# Altium schematic symbol library Antenna.SchLib: 34 symbols
Pins are listed as number, name and electrical type; pins without a type are passive.

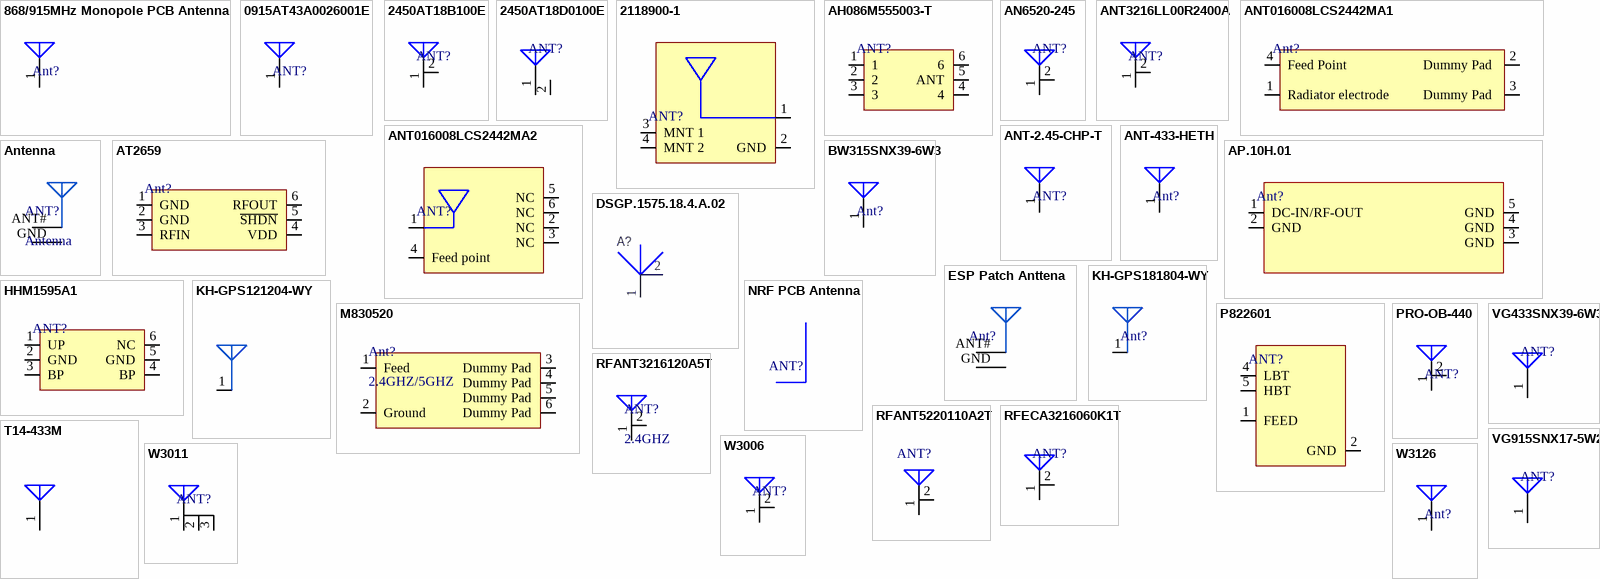
[diagram p0: symbols 868/915MHz Monopole PCB Antenna to W3126]

## 868/915MHz Monopole PCB Antenna
designator Ant?  (no BOM)
Monopole PCB Antenna with Single or Dual Band Option; Manufacturer Part Number: 868/915MHz Monopole PCB Antenna; Item Type: Antenna; ComponentLink1Description: Anttena; ComponentLink1URL: https://www.ti.com/lit/an/swra227e/swra227e.pdf?ts=1705864571951
footprint 868/915MHz Monopole PCB Antenna
pins: 1 FEED 

## 0915AT43A0026001E
designator ANT?
RF ANT 915MHZ CHIP SOLDER SMD; Manufacturer: Johanson; Manufacturer Part Number: 0915AT43A0026001E; Item Type: RF Antennas; Supplier: Digikey; LCSC Part Number: C17443637; RoHS: No; Stock: 101852; Pricing: 1=0.82, 10=0.585, 25=0.5268, 100=0.4622, 250=0.43144, 500=0.4129 (USD)
footprint 0915AT43A0026001E
pins: 1 FEED 

## 2450AT18B100E
designator ANT?
RF ANT 2.4GHZ CHIP SOLDER SMD; Manufacturer: Johanson; Manufacturer Part Number: 2450AT18B100E; Supplier: Arrow Electronics; Supplier Part Number: 2450AT18B100E; RoHS: Yes; Category: RF Antennas; Stock: 792000; Pricing: 3000=0.3724, 6000=0.3688, 9000=0.3651, 12000=0.3615, 15000=0.3579, 30000=0.3542 (USD); ComponentLink1URL: https://datasheet.ciiva.com/24025/antenna-2450at18b100-242422-24025839.pdf?src-supplier=Mouser; ComponentLink1Description: https://datasheet.ciiva.com/24025/antenna-2450at18b100-242422-24025839.pdf?src-supplier=Mouser; ComponentLink2URL: https://datasheet.ciiva.com/1124/1318299-1124918.pdf?src-supplier=Element14; ComponentLink2Description: https://datasheet.ciiva.com/1124/1318299-1124918.pdf?src-supplier=Element14
footprint ANT-1206
pins: 1 FEED, 2 NC

## 2450AT18D0100E
designator ANT?
1.5dBi Chip Antenna 2.4GHz 2W 1206 Antennas ROHS; Manufacturer: Johanson; Manufacturer Part Number: 2450AT18D0100E; Item Type: RF Antennas; Clock Frequency: 2.5GHz; Supplier: Arrow Electronics; Supplier Part Number: 2450AT18D0100E; RoHS: Yes; Stock: 27000; Pricing: 3000=0.2354, 6000=0.2331, 9000=0.2244 (USD); Min Operating Temperature: -40°C; Max Operating Temperature: 125°C; ComponentLink1URL: https://datasheet.ciiva.com/29647/2450at18d0100-29647392.pdf?src-supplier=Digikey; ComponentLink1Description: https://datasheet.ciiva.com/29647/2450at18d0100-29647392.pdf?src-supplier=Digikey; ComponentLink2URL: https://datasheet.ciiva.com/24046/antenna-2450at18d0100-v3-258090-24046431.pdf?src-supplier=Mouser; ComponentLink2Description: https://datasheet.ciiva.com/24046/antenna-2450at18d0100-v3-258090-24046431.pdf?src-supplier=Mouser
footprint 2450AT18D0100E
pins: 1 FEED , 2 GND

## 2118900-1
designator ANT?
Standard GNSS Antenna Linear 50Ohm 1602MHz Surface Mount; Manufacturer: TE Connectivity; Manufacturer Part Number: 2118900-1; VSWR: 2; Number of Bands: 1; Max Power Dissipation: 3W; Supplier 1: Arrow Electronics; RoHS: Yes; Category: RF Antennas; Stock 1: 449; Pricing 1: 1=0.6707, 10=0.6495, 25=0.6314, 100=0.5857, 250=0.5691 (USD); Mounting Technology: Surface Mount; Series: -; RoHS Compliant: Yes; ComponentLink1URL: https://www.te.com/commerce/DocumentDelivery/DDEController?Action=srchrtrv&amp;DocNm=1-1773969-5-GNSS-2118900-1-ant-datasheet&amp;DocType=DS&amp;DocLang=English&src-supplier=Digi-Key; ComponentLink1Description: https://www.te.com/commerce/DocumentDelivery/DDEController?Action=srchrtrv&amp;DocNm=1-1773969-5-GNSS-2118900-1-ant-datasheet&amp;DocType=DS&amp;DocLang=English&src-supplier=Digi-Key; Supplier Part Number 1: 2118900-1; Item Type: GNSS Antenna
footprint 2118900-1
pins: 1, 2 GND (power), 3 MNT 1, 4 MNT 2

## AH086M555003-T
designator ANT?
RF ANT 3.5GHZ/5.6GHZ CHIP SLD; Manufacturer: Taiyo Yuden; Manufacturer Part Number: AH086M555003-T; Item Type: RF Antennas; Supplier: Digikey; LCSC Part Number: C94132; RoHS: Yes; Stock: 4192; Pricing: 1=7.98, 10=5.341, 25=4.6536, 100=3.8766, 250=3.49504, 500=3.375 (USD); ComponentLink1URL: https://datasheet.ciiva.com/2791/ah-086m555003-ss-2791894.pdf?src-supplier=Digikey; ComponentLink1Description: https://datasheet.ciiva.com/2791/ah-086m555003-ss-2791894.pdf?src-supplier=Digikey; ComponentLink2URL: https://datasheet.ciiva.com/28414/1918813-28414122.pdf?src-supplier=Element14; ComponentLink2Description: https://datasheet.ciiva.com/28414/1918813-28414122.pdf?src-supplier=Element14; ComponentLink3URL: https://datasheet.ciiva.com/3306/chipantenna01-e-3306567.pdf?src-supplier=Avnet; ComponentLink3Description: https://datasheet.ciiva.com/3306/chipantenna01-e-3306567.pdf?src-supplier=Avnet; ComponentLink4URL: https://datasheet.ciiva.com/8153/chipantenna01-e-8153000.pdf?src-supplier=Avnet; ComponentLink4Description: https://datasheet.ciiva.com/8153/chipantenna01-e-8153000.pdf?src-supplier=Avnet; ComponentLink5URL: https://datasheet.ciiva.com/1125/chipantenna01-e-1125194.pdf?src-supplier=Element14; ComponentLink5Description: https://datasheet.ciiva.com/1125/chipantenna01-e-1125194.pdf?src-supplier=Element14; ComponentLink6URL: https://datasheet.ciiva.com/2791/chipantenna01-e-2791895.pdf?src-supplier=Digikey; ComponentLink6Description: https://datasheet.ciiva.com/2791/chipantenna01-e-2791895.pdf?src-supplier=Digikey; ComponentLink7URL: https://datasheet.ciiva.com/2791/chipantenna01-e-2791896.pdf?src-supplier=Digikey; ComponentLink7Description: https://datasheet.ciiva.com/2791/chipantenna01-e-2791896.pdf?src-supplier=Digikey
footprint AH086M555003-T
pins: 1, 2, 3, 4, 5 ANT, 6

## AN6520-245
designator ANT?
SMD Antennas ROHS; Manufacturer: Rainsun microwave Tech; Manufacturer Part Number: AN6520-245; ComponentLink1Description: LCSC; ComponentLink1URL: https://www.lcsc.com/product-detail/Antennas_Rainsun-microwave-Tech-AN6520-245_C239238.html; Footprint: SMD; LCSC Part Number: C239238
footprint AN6520-245
pins: 1 FEED, 2 NC

## ANT3216LL00R2400A
designator ANT?
5.05dBi Chip antenna Linear 160MHz 2.45GHz 1W 1206 Antennas ROHS; Manufacturer: YAGEO; Manufacturer Part Number: ANT3216LL00R2400A; ComponentLink1Description: LCSC; ComponentLink1URL: https://www.lcsc.com/product-detail/Antennas_YAGEO-ANT3216LL00R2400A_C293767.html; Package: 1206; LCSC Part Number: C293767; Item Type: Antenna
footprint ANT-1206
footprint ANT3216LL00R2400A
pins: 1 Feed, 2 NC

## ANT016008LCS2442MA1
designator Ant?
RF ANT 2.4GHZ CHIP SOLDER SMD; Manufacturer: TDK; Manufacturer Part Number: ANT016008LCS2442MA1; Number of Bands: 1; Clock Frequency: 2.442GHz; VSWR: 3; Item Type: Antenna; Supplier: Arrow Electronics; Supplier Part Number: ANT016008LCS2442MA1; RoHS: Yes; Category: RF Antennas; Stock: 9369; Pricing: 1=0.2741, 10=0.2669, 25=0.2642, 100=0.2529, 250=0.2504, 500=0.2494, 1000=0.2485, 3000=0.2475, 6000=0.2466 (USD); Mounting Technology: Surface Mount; Packaging: Cut Tape; Termination: Solder; Series: -; Height: 0.016inch; Reach SVHC Compliant: No; RoHS Compliant: Yes; ComponentLink1URL: https://datasheet.ciiva.com/30000/rf-ant-ant016008lcs2442ma1-en-30000418.pdf?src-supplier=Avnet; ComponentLink1Description: https://datasheet.ciiva.com/30000/rf-ant-ant016008lcs2442ma1-en-30000418.pdf?src-supplier=Avnet
footprint ANT016008LCS2442MA1
pins: 1 Radiator electrode, 2 Dummy Pad , 3 Dummy Pad , 4 Feed Point

## ANT016008LCS2442MA2
designator ANT?
RF ANT 2.4GHZ CHIP SOLDER SMD; Manufacturer: TDK; Manufacturer Part Number: ANT016008LCS2442MA2; Item Type: RF Antennas; Supplier: Digikey; LCSC Part Number: C209892; RoHS: Yes; Stock: 21692; Pricing: 1=1.25, 10=0.76, 25=0.6328, 100=0.4886, 250=0.41772, 500=0.3741, 1000=0.33755 (USD); ComponentLink1URL: http://www.farnell.com/datasheets/2294435.pdf?src-supplier=Farnell; ComponentLink1Description: http://www.farnell.com/datasheets/2294435.pdf?src-supplier=Farnell; ComponentLink2URL: https://product.tdk.com/info/en/documents/data_sheet/rf_ant_ant016008lcs2442ma2_summary_en.pdf?src-supplier=Digikey; ComponentLink2Description: https://product.tdk.com/info/en/documents/data_sheet/rf_ant_ant016008lcs2442ma2_summary_en.pdf?src-supplier=Digikey; ComponentLink3URL: https://product.tdk.com/info/en/documents/data_sheet/rf_ant_ant016008lcs2442ma2_summary_en.pdf?ref_disty=digikey&src-supplier=Digikey; ComponentLink3Description: https://product.tdk.com/info/en/documents/data_sheet/rf_ant_ant016008lcs2442ma2_summary_en.pdf?ref_disty=digikey&src-supplier=Digikey; ComponentLink4URL: https://product.tdk.com/info/en/documents/data_sheet/rf_ant_ant016008lcs2442ma2_en.pdf?src-supplier=Avnet; ComponentLink4Description: https://product.tdk.com/info/en/documents/data_sheet/rf_ant_ant016008lcs2442ma2_en.pdf?src-supplier=Avnet; ComponentLink5URL: http://www.farnell.com/datasheets/1932405.pdf?src-supplier=Element14; ComponentLink5Description: http://www.farnell.com/datasheets/1932405.pdf?src-supplier=Element14; ComponentLink6URL: https://datasheet.octopart.com/ANT016008LCS2442MA2-TDK-datasheet-43365996.pdf?src-supplier=Newark; ComponentLink6Description: https://datasheet.octopart.com/ANT016008LCS2442MA2-TDK-datasheet-43365996.pdf?src-supplier=Newark
footprint ANT016008LCS2442MA2
pins: 1 Radiator electrode, 2 NC, 3 NC, 4 Feed point, 5 NC, 6 NC

## ANT-2.45-CHP-T
designator ANT?
RF ANT 2.4GHZ CHIP SOLDER SMD; Manufacturer: TE Connectivity Linx; Manufacturer Part Number: ANT-2.45-CHP-T; Item Type: Antenna; Package: Custom; ComponentLink1Description: Digikey; ComponentLink1URL: https://www.digikey.com/en/products/detail/te-connectivity-linx/ANT-2-45-CHP-T/523151?s=N4IgTCBcDaIIIDkAqBaMA6ALAVhQYQAkAFFJEAXQF8g
footprint ANT-2.45-CHP-T
pins: 1 FEED 

## ANT-433-HETH
designator Ant?
RF ANT 433MHZ HELICAL SLD TH; Manufacturer: TE Connectivity; Manufacturer Part Number: ANT-433-HETH; Item Type: Antenna; Package: Custom
footprint ANT-433-HETH
pins: 1 FEED 

## Antenna
designator ANT?  (no BOM)
footprint ANT*
pins: ANT# 1, GND 2

## AP.10H.01
designator Ant?
RF ANT 1.575GHZ CER PATCH SLD; Manufacturer: Taoglas; Manufacturer Part Number: AP.10H.01; Item Type: RF Antennas; Supplier: Digikey; Supplier Part Number: 931-1150-1-ND; RoHS: Yes; Stock: 996; Pricing: 1=23.02, 100=17.71 (USD); ComponentLink1URL: https://datasheet.ciiva.com/4432/ap-10h-01-19479-4432605.pdf?src-supplier=Mouser; ComponentLink1Description: https://datasheet.ciiva.com/4432/ap-10h-01-19479-4432605.pdf?src-supplier=Mouser; ComponentLink2URL: https://datasheet.ciiva.com/2792/ap-10h-01-2792858.pdf?src-supplier=Digikey; ComponentLink2Description: https://datasheet.ciiva.com/2792/ap-10h-01-2792858.pdf?src-supplier=Digikey; ComponentLink3URL: https://datasheet.ciiva.com/2792/ap-10h-01-2792859.pdf?src-supplier=Digikey; ComponentLink3Description: https://datasheet.ciiva.com/2792/ap-10h-01-2792859.pdf?src-supplier=Digikey; ComponentLink4URL: https://datasheet.ciiva.com/2792/ap-10h-01-2792860.pdf?src-supplier=Digikey; ComponentLink4Description: https://datasheet.ciiva.com/2792/ap-10h-01-2792860.pdf?src-supplier=Digikey
footprint AP.10H.01
pins: 1 DC-IN/RF-OUT, 2 GND (power), 3 GND (power), 4 GND (power), 5 GND (power)

## AT2659
designator Ant?
1.4V~3.6V 4.3mA DFN-6(1x1.6) Low Noise Amplifiers (LNA) - RF ROHS; Manufacturer: ZHONGKEWEI; Manufacturer Part Number: AT2659; Package: DFN-6(1x1.6); LCSC Part Number: C92450; Item Type: LNA; ComponentLink1Description: LCSC; ComponentLink1URL: https://www.lcsc.com/product-detail/Low-Noise-Amplifiers-LNA-RF_ZHONGKEWEI-AT2659_C92450.html
footprint DFN-6(1x1.6)
pins: 1 GND, 2 GND, 3 RFIN, 4 VDD, 5 ~{SH}~{DN}, 6 RFOUT

## BW315SNX39-6W3
designator Ant?
1.8 3dBi Vertical 50W Antennas ROHS; Manufacturer: BAT WIRELESS; Manufacturer Part Number: BW315SNX39-6W3; Package: Custom; LCSC Part Number: C496553; Item Type: Antenna; ComponentLink1Description: LCSC; ComponentLink1URL: https://www.lcsc.com/product-detail/Antennas_BAT-WIRELESS-BW315SNX39-6W3_C496553.html
footprint BW315SNX39-6W3
pins: 1 FEED 

## DSGP.1575.18.4.A.02
designator A?
GPS SMT PATCH ANTENNA; Manufacturer: Taoglas; Manufacturer Part Number: DSGP.1575.18.4.C.02; Part number NEMS: 100700073; Component Status: Active; ComponentLink1URL: https://www.taoglas.com/datasheets/DSGP.1575.18.4.A.02.pdf; ComponentLink1Description: Datasheet; ComponentLink2URL: https://www.digikey.com/product-detail/en/taoglas-limited/DSGP.1575.18.4.A.02/931-1511-1-ND/8275289; ComponentLink2Description: Supplier link; Author: rubr; PartId: 100700073; Item Type: ANTENNA
footprint DSGP.1575.18.4.A.02
pins: 1, 2

## ESP Patch Anttena
designator Ant?  (net tie, no BOM)
ESP32 MIFA PCB ANTENNA; Manufacturer Part Number: ESP Patch Anttena; Item Type: Antenna
footprint ESP Patch Antenna
pins: ANT# 1, GND 2

## HHM1595A1
designator ANT?
BALUN 3GHZ-8GHZ 50/100 0805; Manufacturer: TDK; Manufacturer Part Number: HHM1595A1; Item Type: C112665; Supplier: Digikey; LCSC Part Number: C112665; RoHS: Yes; Stock: 8835; Pricing: 1=0.34, 10=0.312, 25=0.3008, 50=0.292, 100=0.2836, 250=0.27264, 500=0.26456, 1000=0.25667 (USD); ComponentLink1URL: https://datasheet.ciiva.com/4547/e751-multibalun-hhm18-20070-4547862.pdf?src-supplier=Mouser; ComponentLink1Description: https://datasheet.ciiva.com/4547/e751-multibalun-hhm18-20070-4547862.pdf?src-supplier=Mouser; ComponentLink2URL: https://datasheet.ciiva.com/30013/rf-balun-hhm1595a1-en-30013313.pdf?src-supplier=Avnet; ComponentLink2Description: https://datasheet.ciiva.com/30013/rf-balun-hhm1595a1-en-30013313.pdf?src-supplier=Avnet; ComponentLink3URL: https://datasheet.ciiva.com/2788/rf-balun-hhm1583b1-en-2788708.pdf?src-supplier=Digikey; ComponentLink3Description: https://datasheet.ciiva.com/2788/rf-balun-hhm1583b1-en-2788708.pdf?src-supplier=Digikey; ComponentLink4URL: https://datasheet.ciiva.com/2788/rf-balun-hhm1583b1-en-2788709.pdf?src-supplier=Digikey; ComponentLink4Description: https://datasheet.ciiva.com/2788/rf-balun-hhm1583b1-en-2788709.pdf?src-supplier=Digikey; ComponentLink5URL: https://datasheet.ciiva.com/2788/rf-balun-hhm1583b1-en-2788710.pdf?src-supplier=Digikey; ComponentLink5Description: https://datasheet.ciiva.com/2788/rf-balun-hhm1583b1-en-2788710.pdf?src-supplier=Digikey
footprint HHM1595A1
pins: 1 UP, 2 GND, 3 BP, 4 BP, 5 GND, 6 NC

## KH-GPS121204-WY
designator ANT?
Antennas ROHS; Manufacturer: Shenzhen Kinghelm Elec; Manufacturer Part Number: KH-GPS121204-WY; Package: Custom; LCSC Part Number: C962213; Item Type: Antenna; ComponentLink1Description: LCSC; ComponentLink1URL: https://www.lcsc.com/product-detail/Antennas_Shenzhen-Kinghelm-Elec-KH-GPS121204-WY_C962213.html
footprint KH-GPS121204-WY
pins: 1

## KH-GPS181804-WY
designator Ant?
GPS passive ceramic antenna, size 18*18*; Manufacturer: Shenzhen Kinghelm Elec; Manufacturer Part Number: KH-GPS181804-WY; Package: Custom; LCSC Part Number: C962215; Item Type: Antenna; ComponentLink1Description: LCSC; ComponentLink1URL: https://www.lcsc.com/product-detail/Antennas_Shenzhen-Kinghelm-Elec-KH-GPS181804-WY_C962215.html
footprint KH-GPS181804-WY
pins: 1

## M830520
designator Ant?, comment 2.4GHZ/5GHZ
RF ANT 2.4GHZ/5GHZ CHIP SLDR SMD; Manufacturer: Kyocera AVX; Manufacturer Part Number: M830520; Item Type: RF Antennas; Supplier: Digikey; Supplier Part Number: 478-M830520CT-ND; RoHS: Yes; Stock: 8304; Pricing: 1=2.07, 10=1.856, 25=1.7512, 100=1.4919, 250=1.4008, 500=1.2257 (USD); ComponentLink1URL: http://www.farnell.com/datasheets/2620173.pdf?src-supplier=Farnell; ComponentLink1Description: http://www.farnell.com/datasheets/2620173.pdf?src-supplier=Farnell; ComponentLink2URL: http://datasheet.octopart.com/M830520-KYOCERA-AVX-datasheet-128393616.pdf?src-supplier=Newark; ComponentLink2Description: http://datasheet.octopart.com/M830520-KYOCERA-AVX-datasheet-128393616.pdf?src-supplier=Newark; ComponentLink3URL: http://datasheet.octopart.com/M830520-KYOCERA-AVX-datasheet-128393616.pdf?src-supplier=Rs; ComponentLink3Description: http://datasheet.octopart.com/M830520-KYOCERA-AVX-datasheet-128393616.pdf?src-supplier=Rs; ComponentLink4URL: http://www.farnell.com/datasheets/2620173.pdf?src-supplier=Newark; ComponentLink4Description: http://www.farnell.com/datasheets/2620173.pdf?src-supplier=Newark; ComponentLink5URL: http://datasheet.octopart.com/M830520-KYOCERA-AVX-datasheet-128393616.pdf?src-supplier=Future+Electronics; ComponentLink5Description: http://datasheet.octopart.com/M830520-KYOCERA-AVX-datasheet-128393616.pdf?src-supplier=Future+Electronics; ComponentLink6URL: http://datasheet.octopart.com/M830520-KYOCERA-AVX-datasheet-128393616.pdf?src-supplier=Mouser; ComponentLink6Description: http://datasheet.octopart.com/M830520-KYOCERA-AVX-datasheet-128393616.pdf?src-supplier=Mouser; ComponentLink7URL: http://datasheet.octopart.com/M830520-KYOCERA-AVX-datasheet-128393616.pdf?src-supplier=TTI; ComponentLink7Description: http://datasheet.octopart.com/M830520-KYOCERA-AVX-datasheet-128393616.pdf?src-supplier=TTI; ComponentLink8URL: http://datasheet.octopart.com/M830520-KYOCERA-AVX-datasheet-128393616.pdf?src-supplier=Symmetry+Electronics; ComponentLink8Description: http://datasheet.octopart.com/M830520-KYOCERA-AVX-datasheet-128393616.pdf?src-supplier=Symmetry+Electronics; LCSC Part Number: C5221067
footprint M830520
pins: 1 Feed, 2 Ground, 3 Dummy Pad, 4 Dummy Pad, 5 Dummy Pad, 6 Dummy Pad

## NRF PCB Antenna
designator ANT?  (no BOM)
PCB Antenna
footprint NRF PCB ANTENNA

## P822601
designator ANT?
RF ANT 700MHZ/750MHZ FLAT BAR; Manufacturer: AVX; Manufacturer Part Number: P822601; Item Type: RF Antennas; Number of Bands: 3NUMBER; Frequency: 2.7GHz; Gain: 3.4dB; Impedance: 50R; Power Rating: 2W; Supplier: Digikey; RoHS: Yes; Stock: 7895; Pricing: 1=5.7, 10=3.826, 25=3.3392, 100=2.7938 (USD); Min Operating Temperature: -40°C; Max Operating Temperature: 85°C; Clock Frequency: 2.7GHz; Height: 3.5mm; ComponentLink1URL: http://www.farnell.com/datasheets/2620174.pdf?src-supplier=Farnell; ComponentLink1Description: http://www.farnell.com/datasheets/2620174.pdf?src-supplier=Farnell; ComponentLink2URL: http://www.farnell.com/datasheets/2620174.pdf?src-supplier=Newark; ComponentLink2Description: http://www.farnell.com/datasheets/2620174.pdf?src-supplier=Newark; ComponentLink3URL: http://www.farnell.com/datasheets/2620174.pdf?src-supplier=Element14; ComponentLink3Description: http://www.farnell.com/datasheets/2620174.pdf?src-supplier=Element14; ComponentLink4URL: https://datasheet.octopart.com/P822601-KYOCERA-AVX-datasheet-165822267.pdf?src-supplier=Future+Electronics; ComponentLink4Description: https://datasheet.octopart.com/P822601-KYOCERA-AVX-datasheet-165822267.pdf?src-supplier=Future+Electronics
footprint P822601
pins: 1 FEED, 2 GND, 4 LBT, 5 HBT

## PRO-OB-440
designator ANT?
RF ANT 2.4GHZ STAMPED MET SLD; Manufacturer: Proant; Manufacturer Part Number: PRO-OB-440; Number of Bands: 1; Return Loss: -10dB; Supplier 1: Digi-Key; Stock 1: 23502; Pricing 1: 1=0.74, 10=0.647, 25=0.608, 100=0.4964, 250=0.46104, 500=0.39238 (USD); Mount: Surface Mount; Packaging: Cut Tape; Termination: Solder; ComponentLink1URL: https://media.digikey.com/pdf/Data%20Sheets/Proant%20PDF's/PRO-OB-440_Dwg.PDF?src-supplier=Digi-Key; ComponentLink1Description: https://media.digikey.com/pdf/Data%20Sheets/Proant%20PDF's/PRO-OB-440_Dwg.PDF?src-supplier=Digi-Key; ComponentLink2URL: http://www.proant.se/files/user/Application%20note%20-%20OnBoard%20SMD%20GNSS%20rev%202.0.pdf?src-supplier=Digi-Key; ComponentLink2Description: http://www.proant.se/files/user/Application%20note%20-%20OnBoard%20SMD%20GNSS%20rev%202.0.pdf?src-supplier=Digi-Key; ComponentLink3URL: http://www.proant.se/files/user/Documents/Datasheet%20-%20OnBoard%20SMD%202400%20MHz%20rev%203.pdf?src-supplier=Digi-Key; ComponentLink3Description: http://www.proant.se/files/user/Documents/Datasheet%20-%20OnBoard%20SMD%202400%20MHz%20rev%203.pdf?src-supplier=Digi-Key; Supplier Part Number 1: 1532-1001-6-ND
footprint PRO-OB-440_ (RF ANT 2.4GHZ STAMPED MET SLD)
pins: 1 A, 2 A, 3 A hidden, 4 A hidden

## RFANT3216120A5T
designator ANT?, comment 2.4GHZ
2.4GHZ CERAMIC CHIP ANTENNA; Manufacturer: Walsin Technologies; Manufacturer Part Number: RFANT3216120A5T; Bandwidth: 150MHz; Impedance: 50R; Number of Bands: 1; VSWR: 2; Supplier: Digikey; Supplier Part Number: 1292-1000-1-ND; RoHS: Yes; Category: RF Antennas; Stock: 28669; Pricing: 1=0.5, 10=0.403, 25=0.3692, 100=0.2747, 250=0.24896, 500=0.20604, 1000=0.15453 (USD); Mounting Technology: Surface Mount; Case/Package: CSMD; Pins: 2; Package Quantity: 2000; Packaging: Tape and Reel; Frequency: 2.4GHz; Termination: Solder; Series: -; Radiation Hardening: No; ComponentLink1URL: https://datasheet.ciiva.com/26865/getdatasheetpartid-490374-26865067.pdf?src-supplier=Verical; ComponentLink1Description: https://datasheet.ciiva.com/26865/getdatasheetpartid-490374-26865067.pdf?src-supplier=Verical; ComponentLink2URL: https://datasheet.ciiva.com/26233/1-2rfant3216120a5t-26233244.pdf?src-supplier=Digikey; ComponentLink2Description: https://datasheet.ciiva.com/26233/1-2rfant3216120a5t-26233244.pdf?src-supplier=Digikey; ComponentLink3URL: https://datasheet.ciiva.com/26233/1-2rfant3216120a5t-26233238.pdf?src-supplier=Digikey; ComponentLink3Description: https://datasheet.ciiva.com/26233/1-2rfant3216120a5t-26233238.pdf?src-supplier=Digikey; LCSC Part Number: C127629; Item Type: Antenna
footprint RFANT3216120A5T
pins: 1 A, 2 NC

## RFANT5220110A2T
designator ANT?
SMD,5.2x2x1.1mm Antennas ROHS; Manufacturer: Walsin Tech; Manufacturer Part Number: RFANT5220110A2T; ComponentLink1Description: LCSC; ComponentLink1URL: https://www.lcsc.com/product-detail/Antennas_Walsin-Tech-Corp-RFANT5220110A2T_C201761.html; Footprint: Custom; LCSC Part Number: C201761
footprint RFANT5220110A2T_
pins: 1 A, 2 NC

## RFECA3216060K1T
designator ANT?
1206 Antennas ROHS; Manufacturer: Walsin Tech Corp; Manufacturer Part Number: RFECA3216060K1T; ComponentLink1Description: LCSC; ComponentLink1URL: https://www.lcsc.com/product-detail/Antennas_Walsin-Tech-Corp-RFECA3216060K1T_C2992318.html; Footprint: 1206; LCSC Part Number: C2992318
footprint ANT-1206
pins: 1, 2

## T14-433M
designator ANT?
433MHz helical Antennas ROHS; Manufacturer: DreamLNK; Manufacturer Part Number: T14-433M; LCSC Part Number: C381188; Item Type: Antenna; ComponentLink1Description: LCSC; ComponentLink1URL: https://www.lcsc.com/product-detail/Antennas_DreamLNK-T14-433M_C381188.html
footprint T14-433M
pins: 1 FEED 

## VG433SNX39-6W3
designator ANT?
2 433 spring antenna 2.5dBi Vertical 433MHz 50Ω DIP Antennas ROHS; Manufacturer: Vollgo; Manufacturer Part Number: VG433SNX39-6W3; Package: DIP; LCSC Part Number: C718844; ComponentLink1Description: LCSC; ComponentLink1URL: https://www.lcsc.com/product-detail/Antennas_Vollgo-VG433SNX39-6W3_C718844.html; Item Type: Antenna
footprint VG433SNX39-6W3
pins: 1 FEED 

## VG915SNX17-5W2
designator ANT?
1.8 Helical Antenna Vertical 915MHz 50W Antennas ROHS; Manufacturer: Vollgo; Manufacturer Part Number: VG915SNX17-5W2; Package: Custom; LCSC Part Number: C718842; Item Type: Antenna; ComponentLink1Description: LCSC; ComponentLink1URL: https://lcsc.com/product-detail/Antennas_Vollgo-VG915SNX17-5W2_C718842.html
footprint VG915SNX17-5W2
pins: 1 FEED 

## W3006
designator ANT?
RF ANT 2.4GHZ/5.5GHZ CHIP SLD; Manufacturer: Pulse; Manufacturer Part Number: W3006; Number of Bands: 2; Return Loss: -10dB; Frequency: 5GHz; Impedance: 50R; Max Frequency: 5.85GHz; Min Frequency: 2.4GHz; Item Type: Antenna; Supplier 1: Arrow Electronics; RoHS: Yes; Category: RF Antennas; Stock 1: 3000; Pricing 1: 1000=1.00560, 2000=0.97680 (USD); Mount: Surface Mount; Case/Package: SMD/SMT; Number of Pins: 2; Contact Plating: Tin,Matte; Min Operating Temperature: -40°C; Max Operating Temperature: 85°C; Termination: Solder; Packaging: Bulk; Package Quantity: 1; Series: -; Length: 10mm; Width: 3.2mm; Height: 0.059inch; Radiation Hardening: No; RoHS Compliant: Yes; ComponentLink1URL: https://datasheet.ciiva.com/2792/+w3006-2792242.pdf?src-supplier=Digi-Key; ComponentLink1Description: https://datasheet.ciiva.com/2792/+w3006-2792242.pdf?src-supplier=Digi-Key; ComponentLink2URL: https://datasheet.ciiva.com/4432/w3006-203400-4432372.pdf?src-supplier=Mouser; ComponentLink2Description: https://datasheet.ciiva.com/4432/w3006-203400-4432372.pdf?src-supplier=Mouser; ComponentLink3URL: https://datasheet.ciiva.com/2792/+w3006-2792243.pdf?src-supplier=Digi-Key; ComponentLink3Description: https://datasheet.ciiva.com/2792/+w3006-2792243.pdf?src-supplier=Digi-Key; ComponentLink4URL: https://datasheet.ciiva.com/2792/+w3006-2792244.pdf?src-supplier=Digi-Key; ComponentLink4Description: https://datasheet.ciiva.com/2792/+w3006-2792244.pdf?src-supplier=Digi-Key; ComponentLink5URL: https://datasheet.ciiva.com/8152/antennas-g00302-8152982.pdf?src-supplier=Avnet; ComponentLink5Description: https://datasheet.ciiva.com/8152/antennas-g00302-8152982.pdf?src-supplier=Avnet; Supplier Part Number 1: W3006
footprint W3006_
pins: 1 FEED , 2 Support Pad

## W3011
designator ANT?
RF ANT 1.575GHZ CHIP SOLDER SMD; Manufacturer: Pulse; Manufacturer Part Number: W3011; Item Type: Antenna; Frequency: 1.57542GHz; Impedance: 50R; Number of Bands: 1; Return Loss: -12dB; Clock Frequency: 1.58542GHz; Min Frequency: 1.56542GHz; Supplier 1: Digi-Key; RoHS: Yes; Category: RF Antennas; Stock 1: 9327; Pricing 1: 1=1.59, 10=1.431, 25=1.35, 100=1.1502, 250=1.08, 500=0.945, 1000=0.783 (USD); Mounting Technology: Surface Mount,PCB; Package Quantity: 3000; Termination: Solder; Packaging: Cut Tape; Series: -; Height: 0.043inch; RoHS Compliant: Yes; Lead Free: Lead Free; ComponentLink1URL: https://datasheet.ciiva.com/8152/+w3011-w3011a-8152997.pdf?src-supplier=Avnet; ComponentLink1Description: https://datasheet.ciiva.com/8152/+w3011-w3011a-8152997.pdf?src-supplier=Avnet; ComponentLink2URL: https://datasheet.ciiva.com/2792/+w3011-w3011a-2792615.pdf?src-supplier=Digi-Key; ComponentLink2Description: https://datasheet.ciiva.com/2792/+w3011-w3011a-2792615.pdf?src-supplier=Digi-Key; Supplier Part Number 1: 553-2582-1-ND
footprint W3011
pins: 1 FEED , 2 GND, 3 GND

## W3126
designator Ant?
RF ANT 315MHZ HELICAL SOLDER SMD; Manufacturer: Pulse; Manufacturer Part Number: W3126; Impedance: 50R; Number of Bands: 1; Return Loss: -10dB; Gain: -5dB; VSWR: 1.9; Item Type: Antenna; Supplier: Mouser; Supplier Part Number: 673-W3126; RoHS: Yes; Category: RF Antennas; Stock: 256; Pricing: 1=1.73, 10=1.55, 50=1.55, 100=1.25, 1000=0.852, 10000=0.735 (USD); Mounting Technology: Surface Mount,Through Hole,PCB; Packaging: Tray; Series: -; Package Quantity: 1600; Termination: Solder; Frequency: 315MHz; Height: 0.276inch; Radiation Hardening: No; ComponentLink1URL: https://datasheet.ciiva.com/8153/+w3126-8153071.pdf?src-supplier=Avnet; ComponentLink1Description: https://datasheet.ciiva.com/8153/+w3126-8153071.pdf?src-supplier=Avnet; ComponentLink2URL: https://datasheet.ciiva.com/2792/+w3126-2792620.pdf?src-supplier=Digikey; ComponentLink2Description: https://datasheet.ciiva.com/2792/+w3126-2792620.pdf?src-supplier=Digikey
footprint W3126
pins: 1 FEED 